# Altium footprint library lri_footprints_connectors.PcbLib: 2 footprints
Each footprint in its own frame and in the unit in brackets; x right, y up, seen from the top. Pads: shape width x height; smd on the part's side, far side on the other; paste and mask are expansions set on the pad; w line width, h text height; cw(c..) or ccw(c..) is an arc to the next point about the centre after c.
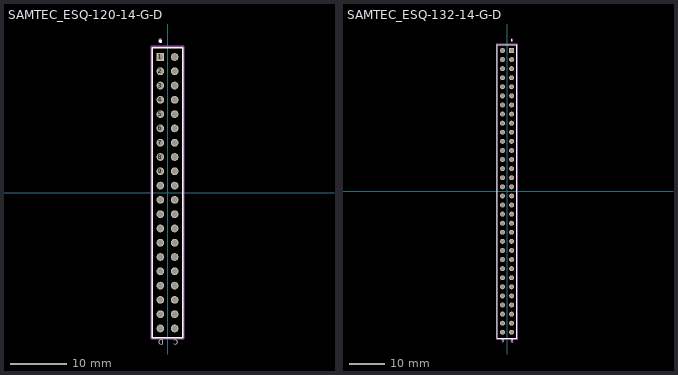
[diagram p0: the footprints below, top view; thin cyan lines are the x and y axes]

## SAMTEC_ESQ-120-14-G-D [mm] "Elevated Socket Strip, 0.100\" Pitch, PC/104 bus connector"
pads (40):
  rect 1.37x1.37 hole 1.02: 1(-1.27,24.13)
  round 1.37 hole 1.02: 2(-1.27,21.59) 3(-1.27,19.05) 4(-1.27,16.51) 5(-1.27,13.97) 6(-1.27,11.43) 7(-1.27,8.89) 8(-1.27,6.35) 9(-1.27,3.81) 10(-1.27,1.27) 11(-1.27,-1.27) 12(-1.27,-3.81) 13(-1.27,-6.35) 14(-1.27,-8.89) 15(-1.27,-11.43) 16(-1.27,-13.97) 17(-1.27,-16.51) 18(-1.27,-19.05) 19(-1.27,-21.59) 20(-1.27,-24.13) 21(1.27,-24.13) 22(1.27,-21.59) 23(1.27,-19.05) 24(1.27,-16.51) 25(1.27,-13.97) 26(1.27,-11.43) 27(1.27,-8.89) 28(1.27,-6.35) 29(1.27,-3.81) 30(1.27,-1.27) 31(1.27,1.27) 32(1.27,3.81) 33(1.27,6.35) 34(1.27,8.89) 35(1.27,11.43) 36(1.27,13.97) 37(1.27,16.51) 38(1.27,19.05) 39(1.27,21.59) 40(1.27,24.13)
Top Overlay:
  circle w0.3: c-1.27,26.924 r0.15
  lines w0.254: -2.675,-25.755 2.675,-25.755 2.675,25.755 -2.675,25.755 -2.675,-25.755
  text "D" at -0.685,-25.821 h1.52
  text "C" at 1.93,-25.775 h1.52
Mechanical 13:
  circle w0.3: c-1.27,27.178 r0.15
  lines w0.254: -2.925,-26.005 2.925,-26.005 2.925,26.005 -2.925,26.005 -2.925,-26.005
  text ".Designator" at -3.723,-3.407 h1.52
3D body "ESQ-120-14-G-D.stp": height 11.06, standoff -12.18, extent -2.54,-25.654 2.54,25.654

## SAMTEC_ESQ-132-14-G-D [mm] "Elevated Socket Strip, 0.100\" Pitch, PC/104 bus connector"
pads (64):
  rect 1.37x1.37 hole 1.02: 1(1.27,39.37)
  round 1.37 hole 1.02: 2(1.27,36.83) 3(1.27,34.29) 4(1.27,31.75) 5(1.27,29.21) 6(1.27,26.67) 7(1.27,24.13) 8(1.27,21.59) 9(1.27,19.05) 10(1.27,16.51) 11(1.27,13.97) 12(1.27,11.43) 13(1.27,8.89) 14(1.27,6.35) 15(1.27,3.81) 16(1.27,1.27) 17(1.27,-1.27) 18(1.27,-3.81) 19(1.27,-6.35) 20(1.27,-8.89) 21(1.27,-11.43) 22(1.27,-13.97) 23(1.27,-16.51) 24(1.27,-19.05) 25(1.27,-21.59) 26(1.27,-24.13) 27(1.27,-26.67) 28(1.27,-29.21) 29(1.27,-31.75) 30(1.27,-34.29) 31(1.27,-36.83) 32(1.27,-39.37) 33(-1.27,-39.37) 34(-1.27,-36.83) 35(-1.27,-34.29) 36(-1.27,-31.75) 37(-1.27,-29.21) 38(-1.27,-26.67) 39(-1.27,-24.13) 40(-1.27,-21.59) 41(-1.27,-19.05) 42(-1.27,-16.51) 43(-1.27,-13.97) 44(-1.27,-11.43) 45(-1.27,-8.89) 46(-1.27,-6.35) 47(-1.27,-3.81) 48(-1.27,-1.27) 49(-1.27,1.27) 50(-1.27,3.81) 51(-1.27,6.35) 52(-1.27,8.89) 53(-1.27,11.43) 54(-1.27,13.97) 55(-1.27,16.51) 56(-1.27,19.05) 57(-1.27,21.59) 58(-1.27,24.13) 59(-1.27,26.67) 60(-1.27,29.21) 61(-1.27,31.75) 62(-1.27,34.29) 63(-1.27,36.83) 64(-1.27,39.37)
Top Overlay:
  circle w0.3: c1.27,42.164 r0.15
  lines w0.2: -2.675,-40.995 2.675,-40.995 2.675,40.995 -2.675,40.995 -2.675,-40.995
  text "A" at -0.685,-40.961 h1.52
  text "B" at 1.93,-40.961 h1.52
Mechanical 13:
  circle w0.3: c1.27,42.418 r0.15
  lines w0.2: -2.925,-41.245 2.925,-41.245 2.925,41.245 -2.925,41.245 -2.925,-41.245
  text ".Designator" at -3.469,-3.407 h1.52
3D body "ESQ-132-14-G-D.stp": height 11.06, standoff -12.18, extent -2.54,-40.894 2.54,40.894